# Altium footprint library LMH13000RQER.PcbLib: 3 footprints
Each footprint in its own frame and in the unit in brackets; x right, y up, seen from the top. Pads: shape width x height; smd on the part's side, far side on the other; paste and mask are expansions set on the pad; w line width, h text height; cw(c..) or ccw(c..) is an arc to the next point about the centre after c.
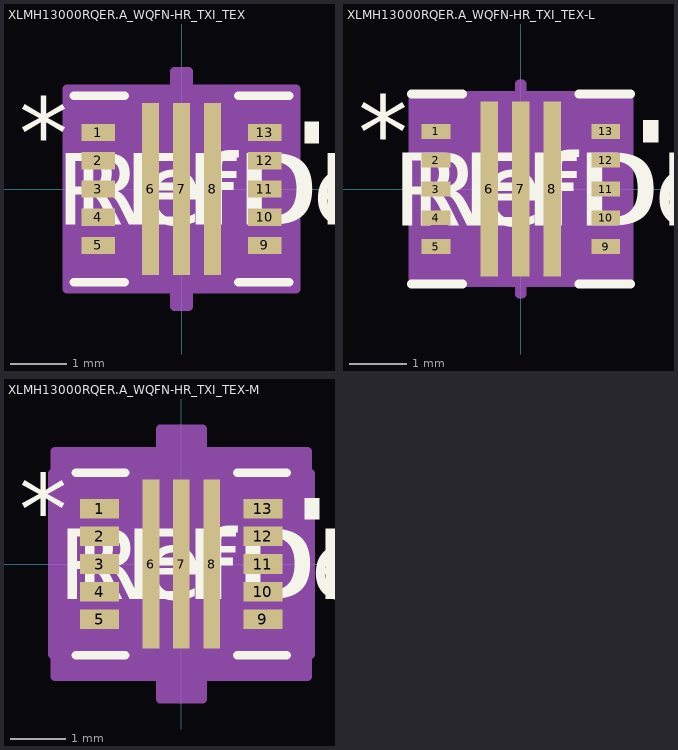
[diagram p0: the footprints below, top view; thin cyan lines are the x and y axes]

## XLMH13000RQER.A_WQFN-HR_TXI_TEX [mm]
pads (13):
  rect 0.6x0.305 smd paste+0 mask+0: 1(-1.475,1) 2(-1.475,0.5) 3(-1.475,0) 4(-1.475,-0.5) 5(-1.475,-1) 9(1.475,-1) 10(1.475,-0.5) 11(1.475,0) 12(1.475,0.5) 13(1.475,1)
  rect 0.305x3.048 smd paste+0 mask+0: 6(-0.55,0) 7(0,0) 8(0.55,0)
Top Overlay:
  region: 2.181,1.191 2.435,1.191 2.435,0.81 2.181,0.81
  lines w0.152: -1.905,-1.651 -1.01,-1.651 ; -1.905,1.651 -1.01,1.651 ; 1.01,-1.651 1.905,-1.651 ; 1.01,1.651 1.905,1.651
  text "*" at -2.88,0.365 h1.27
  text "RefDes" at -1.905,-0.635 h1.27
  text "REFDES" at -2.222,-0.635 h1.27
Mechanical 13:
  lines w0.025: -1.778,0.254 -0.508,1.524 ; -1.778,-1.524 1.778,-1.524 1.778,1.524 -1.778,1.524 -1.778,-1.524 ; -1.778,-1.152 -1.778,-0.848 -1.775,-0.848 -1.775,-1.152 -1.778,-1.152 ; -1.778,-0.652 -1.778,-0.348 -1.775,-0.348 -1.775,-0.652 -1.778,-0.652 ; -1.778,-0.152 -1.778,0.152 -1.775,0.152 -1.775,-0.152 -1.778,-0.152 ; -1.778,0.348 -1.778,0.652 -1.775,0.652 -1.775,0.348 -1.778,0.348 ; -1.778,0.848 -1.778,1.152 -1.775,1.152 -1.775,0.848 -1.778,0.848 ; 1.775,-1.152 1.778,-1.152 1.778,-0.848 1.775,-0.848 1.775,-1.152 ; 1.775,-0.652 1.778,-0.652 1.778,-0.348 1.775,-0.348 1.775,-0.652 ; 1.775,-0.152 1.778,-0.152 1.778,0.152 1.775,0.152 1.775,-0.152 ; 1.775,0.348 1.778,0.348 1.778,0.652 1.775,0.652 1.775,0.348 ; 1.775,0.848 1.778,0.848 1.778,1.152 1.775,1.152 1.775,0.848
  text "*" at -0.705,0.365 h1.27
  text "RefDes2" at -2.222,-0.635 h1.27
Mechanical 15:
  region: -0.131,-1.778 -2.032,-1.778 -2.032,-1.381 -2.032,1.381 -2.032,1.778 -0.131,1.778 -0.131,2.084 0.131,2.084 0.131,1.778 2.032,1.778 2.032,1.381 2.032,-1.381 2.032,-1.778 0.131,-1.778 0.131,-2.084 -0.131,-2.084
  lines w0.152: -2.032,-1.381 -2.032,-1.778 -0.131,-1.778 -0.131,-2.084 0.131,-2.084 0.131,-1.778 2.032,-1.778 2.032,-1.381 ; -2.032,-1.381 -2.032,-1.381 ; -2.032,-1.381 -2.032,1.381 ; -2.032,1.381 -2.032,1.381 ; -2.032,1.381 -2.032,1.778 -0.131,1.778 -0.131,2.084 0.131,2.084 0.131,1.778 2.032,1.778 2.032,1.381 ; 2.032,-1.381 2.032,1.381 ; 2.032,-1.381 2.032,-1.381 ; 2.032,1.381 2.032,1.381
3D body "XLMH13000RQERA_WQFN-HR_TXI_TEX.step": height 0.81, standoff 0, extent -1.778,-1.524 1.778,1.524

## XLMH13000RQER.A_WQFN-HR_TXI_TEX-L [mm]
pads (13):
  rect 0.498x0.254 smd paste+0 mask+0: 1(-1.475,1) 2(-1.475,0.5) 3(-1.475,0) 4(-1.475,-0.5) 5(-1.475,-1) 9(1.475,-1) 10(1.475,-0.5) 11(1.475,0) 12(1.475,0.5) 13(1.475,1)
  rect 0.305x3.048 smd paste+0 mask+0: 6(-0.55,0) 7(0,0) 8(0.55,0)
Top Overlay:
  region: 2.131,1.191 2.385,1.191 2.385,0.81 2.131,0.81
  lines w0.152: -1.905,-1.651 -1.01,-1.651 ; -1.905,1.651 -1.01,1.651 ; 1.01,-1.651 1.905,-1.651 ; 1.01,1.651 1.905,1.651
  text "*" at -2.829,0.365 h1.27
  text "RefDes" at -1.905,-0.635 h1.27
  text "REFDES" at -2.222,-0.635 h1.27
Mechanical 13:
  lines w0.025: -1.778,0.254 -0.508,1.524 ; -1.778,-1.524 1.778,-1.524 1.778,1.524 -1.778,1.524 -1.778,-1.524 ; -1.778,-1.152 -1.778,-0.848 -1.775,-0.848 -1.775,-1.152 -1.778,-1.152 ; -1.778,-0.652 -1.778,-0.348 -1.775,-0.348 -1.775,-0.652 -1.778,-0.652 ; -1.778,-0.152 -1.778,0.152 -1.775,0.152 -1.775,-0.152 -1.778,-0.152 ; -1.778,0.348 -1.778,0.652 -1.775,0.652 -1.775,0.348 -1.778,0.348 ; -1.778,0.848 -1.778,1.152 -1.775,1.152 -1.775,0.848 -1.778,0.848 ; 1.775,-1.152 1.778,-1.152 1.778,-0.848 1.775,-0.848 1.775,-1.152 ; 1.775,-0.652 1.778,-0.652 1.778,-0.348 1.775,-0.348 1.775,-0.652 ; 1.775,-0.152 1.778,-0.152 1.778,0.152 1.775,0.152 1.775,-0.152 ; 1.775,0.348 1.778,0.348 1.778,0.652 1.775,0.652 1.775,0.348 ; 1.775,0.848 1.778,0.848 1.778,1.152 1.775,1.152 1.775,0.848
  text "*" at -0.756,0.365 h1.27
  text "RefDes2" at -2.222,-0.635 h1.27
Mechanical 15:
  region: 0.021,-1.626 -1.88,-1.626 -1.88,-1.229 -1.88,1.229 -1.88,1.626 0.021,1.626 0.021,1.83 -0.021,1.83 -0.021,1.626 1.88,1.626 1.88,1.229 1.88,-1.229 1.88,-1.626 -0.021,-1.626 -0.021,-1.83 0.021,-1.83
  lines w0.152: -1.88,-1.229 -1.88,-1.626 0.021,-1.626 0.021,-1.83 -0.021,-1.83 -0.021,-1.626 1.88,-1.626 1.88,-1.229 ; -1.88,-1.229 -1.88,-1.229 ; -1.88,-1.229 -1.88,1.229 ; -1.88,1.229 -1.88,1.229 ; -1.88,1.229 -1.88,1.626 0.021,1.626 0.021,1.83 -0.021,1.83 -0.021,1.626 1.88,1.626 1.88,1.229 ; 1.88,-1.229 1.88,1.229 ; 1.88,-1.229 1.88,-1.229 ; 1.88,1.229 1.88,1.229
3D body: height 0.25, standoff 0, extent 0,0 0.254,0.254

## XLMH13000RQER.A_WQFN-HR_TXI_TEX-M [mm]
pads (13):
  rect 0.702x0.356 smd paste+0 mask+0: 1(-1.475,1) 2(-1.475,0.5) 3(-1.475,0) 4(-1.475,-0.5) 5(-1.475,-1) 9(1.475,-1) 10(1.475,-0.5) 11(1.475,0) 12(1.475,0.5) 13(1.475,1)
  rect 0.305x3.048 smd paste+0 mask+0: 6(-0.55,0) 7(0,0) 8(0.55,0)
Top Overlay:
  region: 2.232,1.191 2.486,1.191 2.486,0.81 2.232,0.81
  lines w0.152: -1.905,-1.651 -1.01,-1.651 ; -1.905,1.651 -1.01,1.651 ; 1.01,-1.651 1.905,-1.651 ; 1.01,1.651 1.905,1.651
  text "*" at -2.931,0.365 h1.27
  text "RefDes" at -1.905,-0.635 h1.27
  text "REFDES" at -2.222,-0.635 h1.27
Mechanical 13:
  lines w0.025: -1.778,0.254 -0.508,1.524 ; -1.778,-1.524 1.778,-1.524 1.778,1.524 -1.778,1.524 -1.778,-1.524 ; -1.778,-1.152 -1.778,-0.848 -1.775,-0.848 -1.775,-1.152 -1.778,-1.152 ; -1.778,-0.652 -1.778,-0.348 -1.775,-0.348 -1.775,-0.652 -1.778,-0.652 ; -1.778,-0.152 -1.778,0.152 -1.775,0.152 -1.775,-0.152 -1.778,-0.152 ; -1.778,0.348 -1.778,0.652 -1.775,0.652 -1.775,0.348 -1.778,0.348 ; -1.778,0.848 -1.778,1.152 -1.775,1.152 -1.775,0.848 -1.778,0.848 ; 1.775,-1.152 1.778,-1.152 1.778,-0.848 1.775,-0.848 1.775,-1.152 ; 1.775,-0.652 1.778,-0.652 1.778,-0.348 1.775,-0.348 1.775,-0.652 ; 1.775,-0.152 1.778,-0.152 1.778,0.152 1.775,0.152 1.775,-0.152 ; 1.775,0.348 1.778,0.348 1.778,0.652 1.775,0.652 1.775,0.348 ; 1.775,0.848 1.778,0.848 1.778,1.152 1.775,1.152 1.775,0.848
  text "*" at -0.654,0.365 h1.27
  text "RefDes2" at -2.222,-0.635 h1.27
Mechanical 15:
  region: -0.385,-2.032 -2.286,-2.032 -2.286,-1.635 -2.334,-1.635 -2.334,1.635 -2.286,1.635 -2.286,2.032 -0.385,2.032 -0.385,2.439 0.385,2.439 0.385,2.032 2.286,2.032 2.286,1.635 2.334,1.635 2.334,-1.635 2.286,-1.635 2.286,-2.032 0.385,-2.032 0.385,-2.439 -0.385,-2.439
  lines w0.152: -2.334,-1.635 -2.286,-1.635 -2.286,-2.032 -0.385,-2.032 -0.385,-2.439 0.385,-2.439 0.385,-2.032 2.286,-2.032 2.286,-1.635 2.334,-1.635 2.334,1.635 2.286,1.635 2.286,2.032 0.385,2.032 0.385,2.439 -0.385,2.439 -0.385,2.032 -2.286,2.032 -2.286,1.635 -2.334,1.635 -2.334,-1.635
3D body: height 0.25, standoff 0, extent 0,0 0.254,0.254